# Altium schematic symbol library SMAJ5P0A-13-F.SchLib: 1 symbol
Pins are listed as number, name and electrical type; pins without a type are passive.

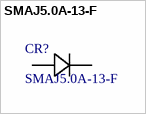
[diagram p0: symbol SMAJ5.0A-13-F]

## SMAJ5.0A-13-F
designator CR?
No Description Available; Manufacturer_Name: Diodes Inc; Copyright: Copyright (C) 2026 Ultra Librarian. All rights reserved.; Manufacturer_Part_Number: SMAJ5.0A-13-F
footprint SMA_DIO
pins: 1, 2